# Altium schematic symbol library B3B-EH-A__LF___SN_.SchLib: 1 symbol
Pins are listed as number, name and electrical type; pins without a type are passive.

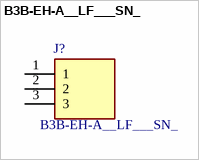
[diagram p0: symbol B3B-EH-A__LF___SN_]

## B3B-EH-A__LF___SN_
designator J?
3 way 1 row top entry header,2.5mm pitch JST EH Series, 2.5mm Pitch 3 Way 1 Row Straight PCB Header, Solder Termination, 3A; Manufacturer_Name: JST (JAPAN SOLDERLESS TERMINALS); Manufacturer_Part_Number: B3B-EH-A (LF) (SN); Geometry.Height: 6mm; Mouser Part Number: *; Mouser Price/Stock: *; Arrow Part Number: *; Arrow Price/Stock: *; Datasheet Link: http://www.jst-mfg.com/product/pdf/eng/eEH.pdf
footprint B3BEHALFSN
pins: 1, 2, 3